# Altium footprint library FootPrintLib_12.PcbLib: 319 footprints (part 15 of 20)
Each footprint in its own frame and in the unit in brackets; x right, y up, seen from the top. Pads: shape width x height; smd on the part's side, far side on the other; paste and mask are expansions set on the pad; w line width, h text height; cw(c..) or ccw(c..) is an arc to the next point about the centre after c.
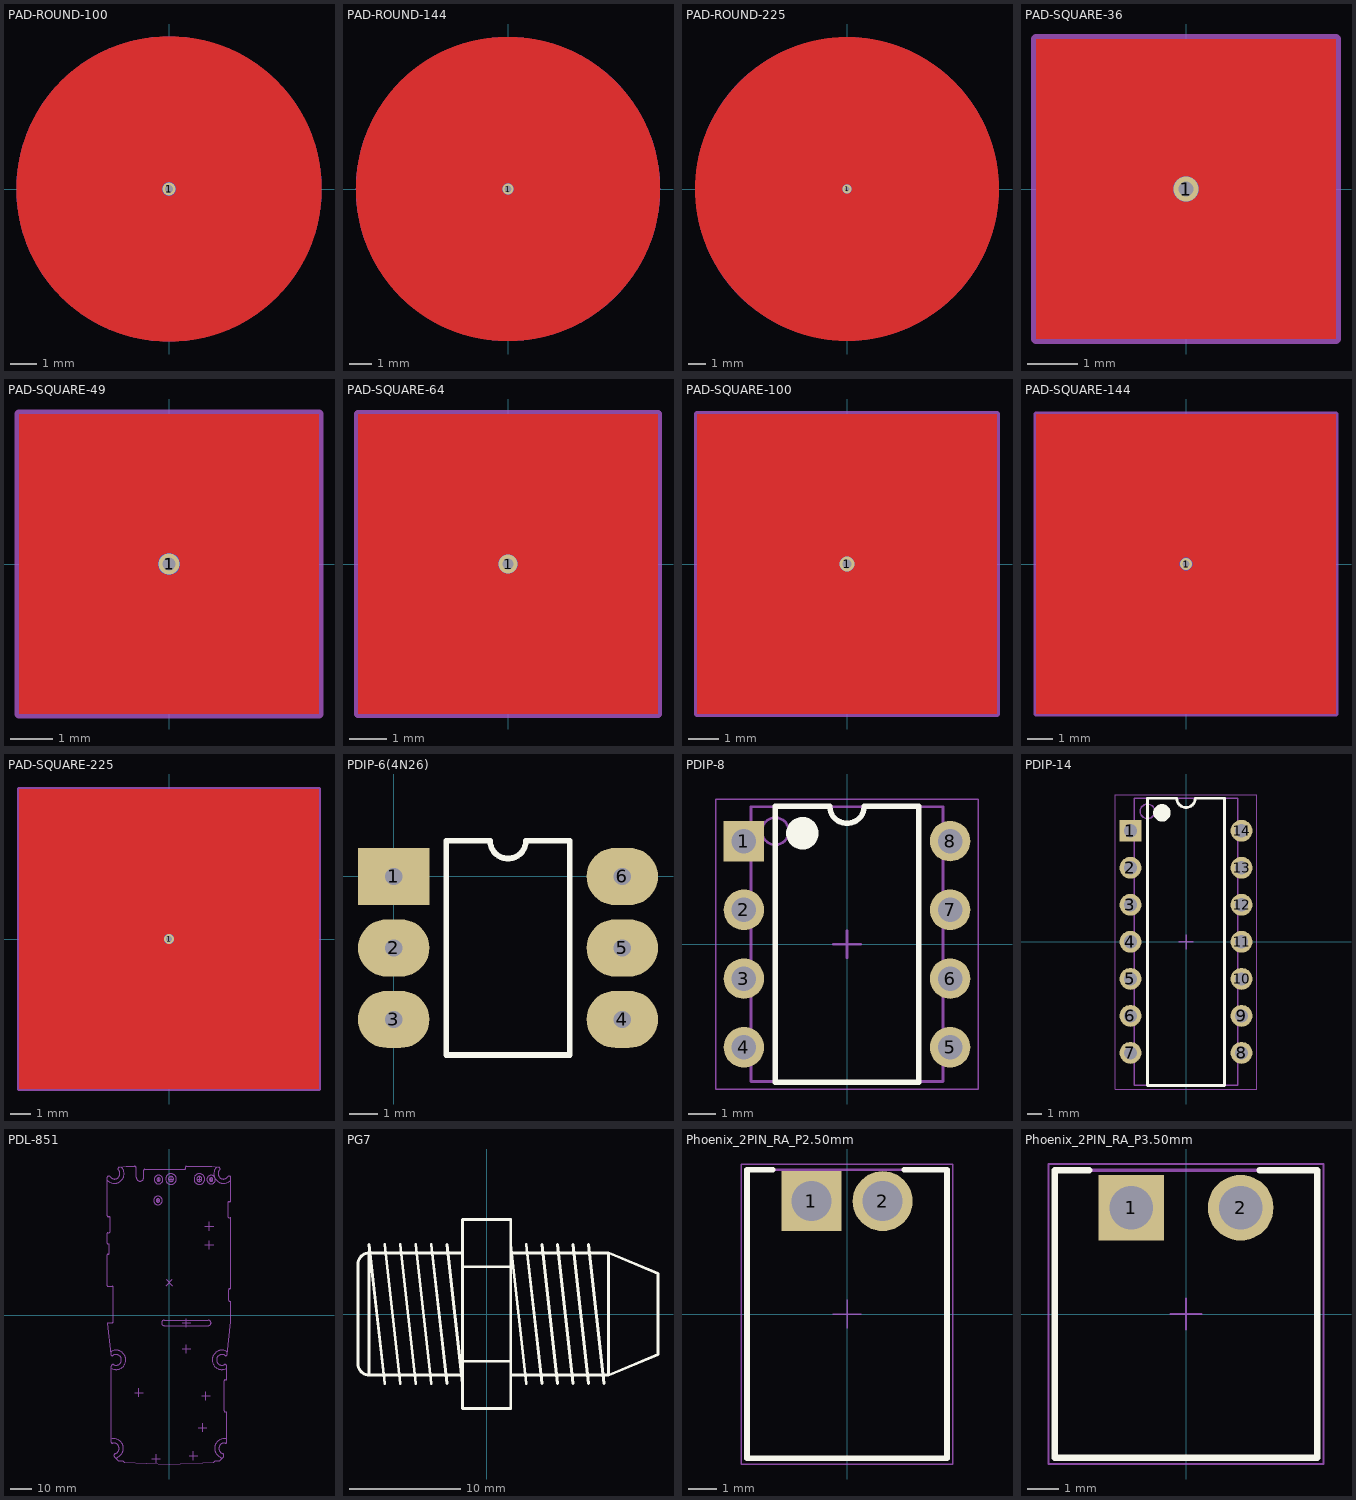
[diagram p14: the footprints below, top view; thin cyan lines are the x and y axes]

## PAD-ROUND-100 [mm] "PAD-ROUND-100,R=5.642mm"
pads (1):
  round 0.5 smd far side: 1(0,0)
via 0,0 diameter 0.5 hole 0.3
Top Layer:
  circle w11.284: c0,0 r0.1
Mechanical 13:
  circle w0.203: c0,0 r5.642

## PAD-ROUND-144 [mm] "PAD-ROUND-144,R=6.770mm"
pads (1):
  round 0.5 smd far side: 1(0,0)
via 0,0 diameter 0.5 hole 0.3
Top Layer:
  circle w13.54: c0,0 r0.1
Mechanical 13:
  circle w0.203: c0,0 r6.77

## PAD-ROUND-225 [mm] "PAD-ROUND-225,R=8.463mm"
pads (1):
  round 0.5 smd far side: 1(0,0)
via 0,0 diameter 0.5 hole 0.3
Top Layer:
  circle w16.926: c0,0 r0.1
Mechanical 13:
  circle w0.203: c0,0 r8.463

## PAD-SQUARE-36 [mm] "PAD-SQUARE-36,L=6mm"
pads (1):
  round 0.5 smd far side: 1(0,0)
via 0,0 diameter 0.5 hole 0.3
Top Layer:
  rectangle: -3,-3 3,3
Mechanical 13:
  lines w0.203: -3,-3 3,-3 3,3 -3,3 -3,-3

## PAD-SQUARE-49 [mm] "PAD-SQUARE-49,L=7mm"
pads (1):
  round 0.5 smd far side: 1(0,0)
via 0,0 diameter 0.5 hole 0.3
Top Layer:
  rectangle: -3.5,-3.5 3.5,3.5
Mechanical 13:
  lines w0.203: -3.5,-3.5 -3.5,3.5 3.5,3.5 3.5,-3.5 -3.5,-3.5

## PAD-SQUARE-64 [mm] "PAD-SQUARE-64,L=8mm"
pads (1):
  round 0.5 smd far side: 1(0,0)
via 0,0 diameter 0.5 hole 0.3
Top Layer:
  rectangle: -4,-4 4,4
Mechanical 13:
  lines w0.203: -4,-4 -4,4 4,4 4,-4 -4,-4

## PAD-SQUARE-100 [mm] "PAD-SQUARE-100,L=10mm"
pads (1):
  round 0.5 smd far side: 1(0,0)
via 0,0 diameter 0.5 hole 0.3
Top Layer:
  rectangle: -5,-5 5,5
Mechanical 13:
  lines w0.203: -5,-5 5,-5 5,5 -5,5 -5,-5

## PAD-SQUARE-144 [mm] "PAD-SQUARE-144,L=12mm"
pads (1):
  round 0.5 smd far side: 1(0,0)
via 0,0 diameter 0.5 hole 0.3
Top Layer:
  rectangle: -6,-6 6,6
Mechanical 13:
  lines w0.203: -6,-6 -6,6 6,6 6,-6 -6,-6

## PAD-SQUARE-225 [mm] "PAD-SQUARE-225,L=15mm"
pads (1):
  round 0.5 smd far side: 1(0,0)
via 0,0 diameter 0.5 hole 0.3
Top Layer:
  rectangle: -7.5,-7.5 7.5,7.5
Mechanical 13:
  lines w0.203: -7.5,-7.5 -7.5,7.5 7.5,7.5 7.5,-7.5 -7.5,-7.5

## PDIP-6(4N26) [mm]
pads (6):
  rect 2.5x2 hole 0.6: 1(0,0)
  oval 2.5x2 hole 0.6: 2(0,-2.5) 3(0,-5) 4(8,-5) 5(8,-2.5) 6(8,0)
Top Overlay:
  lines w0.2: 1.835,-6.25 6.165,-6.25 6.165,1.25 4.625,1.25 cw(c4,1.25) 3.375,1.25 1.835,1.25 1.835,-6.25

## PDIP-8 [mm] "PDIP, 8-Leads, Body 9.5x6.604mm, Pitch 2.54mm"
height 5.34
pads (8):
  rect 1.5x1.5 hole 0.9: 1(-3.81,3.81)
  round 1.5 hole 0.9: 2(-3.81,1.27) 3(-3.81,-1.27) 4(-3.81,-3.81) 5(3.81,-3.81) 6(3.81,-1.27) 7(3.81,1.27) 8(3.81,3.81)
Top Overlay:
  circle w0.6: c-1.65,4.1 r0.3
  lines w0.2: -2.65,-5.1 2.65,-5.1 2.65,5.1 0.635,5.1 cw(c0,5.1) -0.635,5.1 -2.65,5.1 -2.65,-5.1
Mechanical 13:
  circle w0.1: c-2.65,4.175 r0.5
  lines w0.1: -3.55,-5.075 3.55,-5.075 3.55,5.075 -3.55,5.075 -3.55,-5.075
Mechanical 15:
  lines w0.05: -4.85,-5.35 4.85,-5.35 4.85,5.35 -4.85,5.35 -4.85,-5.35
  lines w0.1: -0.5,0 0.5,0 ; 0,-0.5 0,0.5
3D body "User Library-DIP-8P-M01.STEP": height 4.36, standoff -3, extent -3.935,-4.7 3.935,4.7

## PDIP-14 [mm] "DIP, 14-Leads, Body 19.177x6.604mm, Pitch 2.54mm"
height 5.34
pads (14):
  rect 1.5x1.5 hole 0.9: 1(-3.81,7.62)
  round 1.5 hole 0.9: 2(-3.81,5.08) 3(-3.81,2.54) 4(-3.81,0) 5(-3.81,-2.54) 6(-3.81,-5.08) 7(-3.81,-7.62) 8(3.81,-7.62) 9(3.81,-5.08) 10(3.81,-2.54) 11(3.81,0) 12(3.81,2.54) 13(3.81,5.08) 14(3.81,7.62)
Top Overlay:
  circle w0.6: c-1.65,8.85 r0.3
  lines w0.2: -2.65,-9.85 2.65,-9.85 2.65,9.85 0.635,9.85 cw(c0,9.85) -0.635,9.85 -2.65,9.85 -2.65,-9.85
Mechanical 13:
  circle w0.1: c-2.65,8.95 r0.5
  lines w0.1: -3.55,-9.85 3.55,-9.85 3.55,9.85 -3.55,9.85 -3.55,-9.85
Mechanical 15:
  lines w0.05: -4.85,-10.1 4.85,-10.1 4.85,10.1 -4.85,10.1 -4.85,-10.1
  lines w0.1: -0.5,0 0.5,0 ; 0,-0.5 0,0.5
3D body "User Library-DIP-14P-M02.STEP": height 4.36, standoff -3, extent -3.935,-9.8 3.935,9.8

## PDL-851 [mm]
Mechanical 15:
  drawing of 158 lines, arcs and shapes, not listed

## PG7 [mm] "Cable gland plastic - IP 68"
height 27
Top Overlay:
  lines w0.254: -10.575,6.244 -9.175,-6.25 ; -9.175,6.25 -7.775,-6.25 ; -7.775,6.244 -6.375,-6.25 ; -6.375,6.25 -4.975,-6.25 ; -4.975,6.244 -3.575,-6.25 ; -3.575,6.25 -2.175,-6.25 ; -2.175,-5.5 -10.575,-5.5 ; -2.175,-4.25 2.175,-4.25 ; -2.175,4.25 2.175,4.25 ; -2.175,5.5 -10.575,5.5 ; 2.175,-5.5 10.973,-5.5 ; 2.175,5.5 10.973,5.5 ; 2.175,6.25 3.575,-6.25 ; 3.575,6.25 4.975,-6.244 ; 4.975,6.25 6.375,-6.25 ; 6.375,6.25 7.775,-6.244 ; 7.775,6.25 9.175,-6.25 ; 9.175,6.25 10.575,-6.244 ; -10.575,-5.5 cw(c-10.575,-4.5) -11.575,-4.5 -11.575,4.5 cw(c-10.575,4.5) -10.575,5.5 ; -10.575,-5.5 -10.575,5.5 ; 10.973,-5.5 10.973,5.5 ; 10.973,-5.5 15.425,-3.65 15.425,3.65 10.973,5.5 ; -2.175,-8.5 -2.175,8.5 2.175,8.5 2.175,-8.5 -2.175,-8.5
3D body "User Library-PRESSE ETOUPE PGPG 7 (2,5 a 6,5).STEP": height 7.5, standoff -7.5, extent -11.43,-8.499 19.57,8.499

## Phoenix_2PIN_RA_P2.50mm [mm] "Phoenix 2 Pin; Pitch 2.50mm;"
height 8.1
pads (2):
  rect 2.1x2.1 hole 1.4: 1(-1.25,3.95)
  round 2.1 hole 1.4: 2(1.25,3.95)
Top Overlay:
  lines w0.2: -2.6,5.05 -3.5,5.05 -3.5,-5.05 3.5,-5.05 3.5,5.05 2,5.05
Mechanical 13:
  lines w0.1: -3.5,-5.05 3.5,-5.05 3.5,5.05 -3.5,5.05 -3.5,-5.05
Mechanical 15:
  lines w0.05: -0.5,0 0.5,0 ; 0,-0.5 0,0.5 ; -3.7,-5.25 3.7,-5.25 3.7,5.25 -3.7,5.25 -3.7,-5.25
3D body "691382010002.stp": height 8.15, standoff -3.45, extent -3.5,-5.05 3.5,5.05

## Phoenix_2PIN_RA_P3.50mm [mm] "Phoenix 2 Pin; Pitch 3.50mm;"
height 7
pads (2):
  rect 2.1x2.1 hole 1.4: 1(-1.75,3.4)
  round 2.1 hole 1.4: 2(1.75,3.4)
Top Overlay:
  lines w0.2: -3.1,4.6 -4.2,4.6 -4.2,-4.6 4.2,-4.6 4.2,4.6 2.35,4.6
Mechanical 13:
  lines w0.1: -4.2,-4.6 -4.2,4.6 4.2,4.6 4.2,-4.6 -4.2,-4.6
Mechanical 15:
  lines w0.05: -0.5,0 0.5,0 ; 0,-0.5 0,0.5 ; -4.4,-4.8 -4.4,4.8 4.4,4.8 4.4,-4.8 -4.4,-4.8
3D body "691322110002.stp": height 7.3, standoff -3.4, extent -4.2,-4.6 4.2,4.6